# Altium footprint library Water Tank Telemeter.PcbLib: 47 footprints (part 1 of 3)
Each footprint in its own frame and in the unit in brackets; x right, y up, seen from the top. Pads: shape width x height; smd on the part's side, far side on the other; paste and mask are expansions set on the pad; w line width, h text height; cw(c..) or ccw(c..) is an arc to the next point about the centre after c.
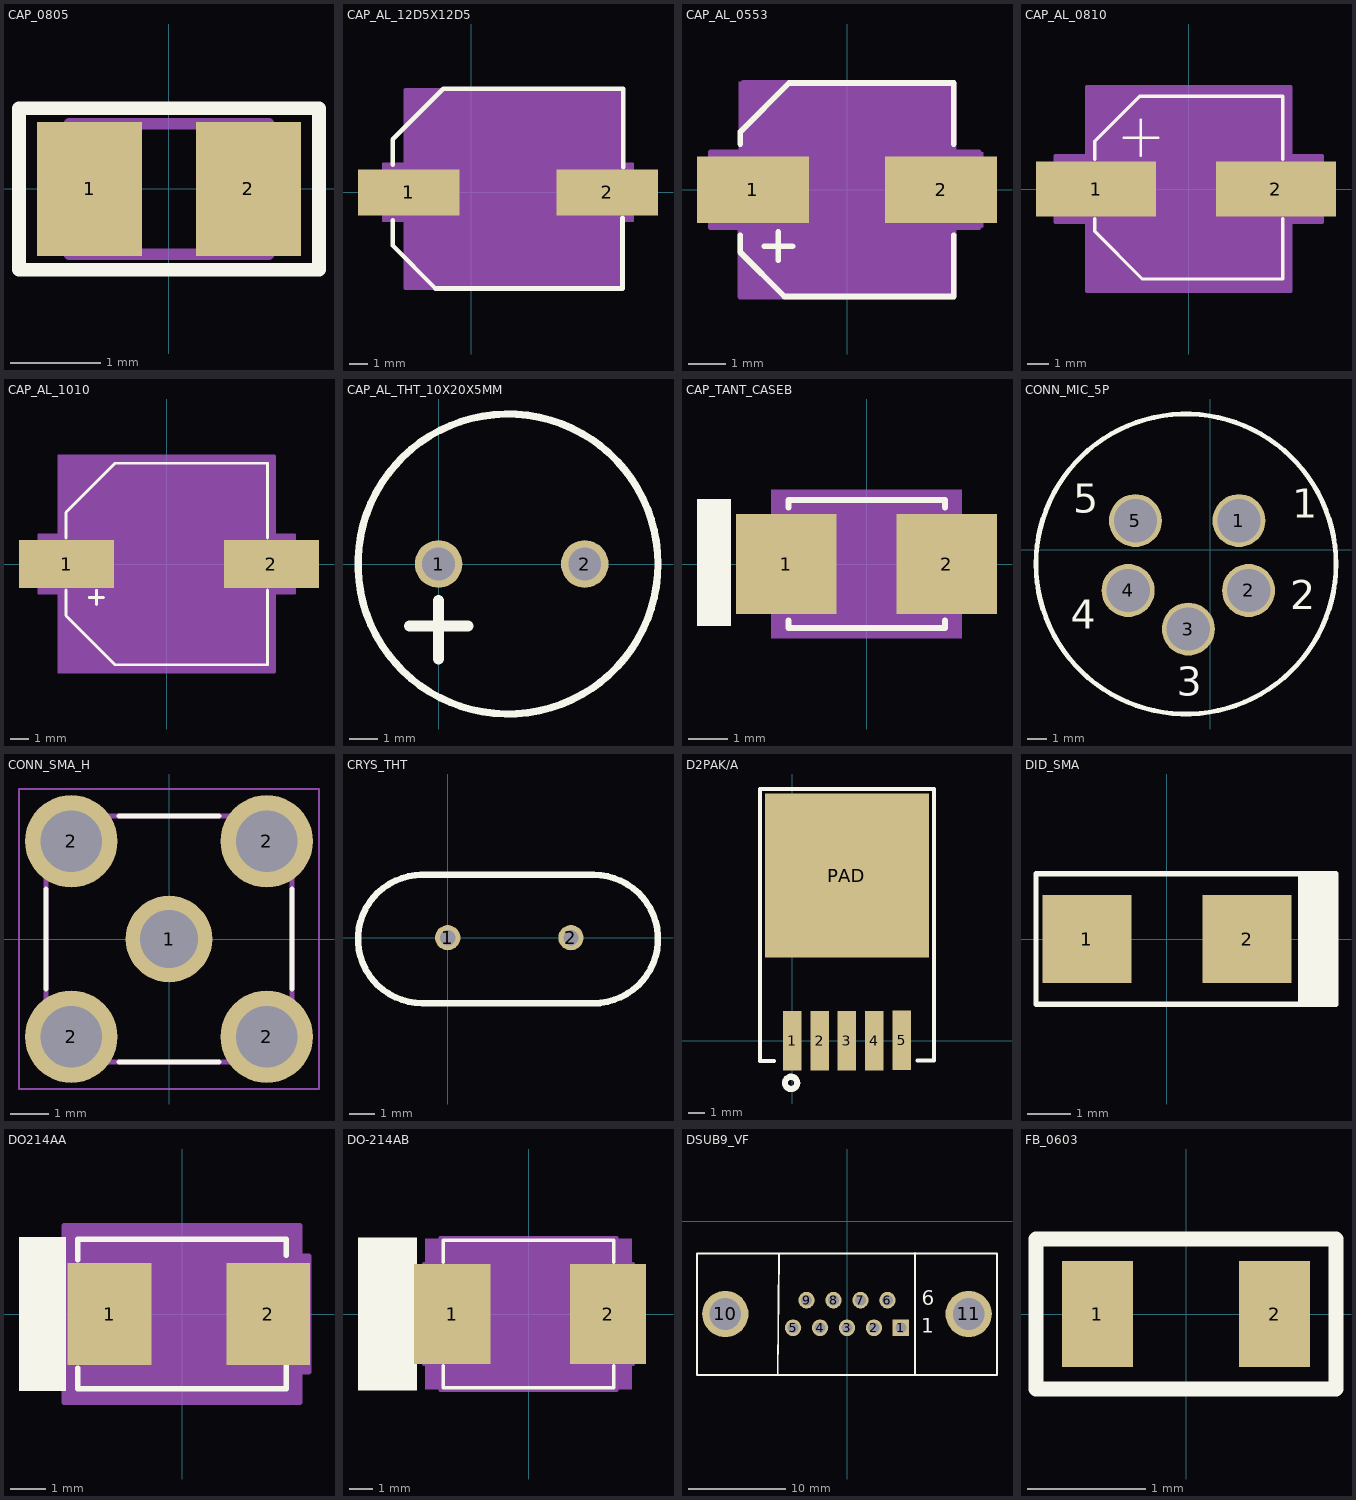
[diagram p0: the footprints below, top view; thin cyan lines are the x and y axes]

## CAP_0805 [mm]
pads (2):
  rect 1.16x1.47 smd: 1(-0.875,0) 2(0.875,0)
Top Overlay:
  lines w0.152: -1.651,-0.889 -1.651,0.889 1.651,0.889 1.651,-0.889 -1.651,-0.889
Mechanical 13:
  lines w0.127: -1.1,-0.72 -1.1,0.72 ; -1.1,-0.72 1.1,-0.72 ; -1.1,-0.72 -1.1,0.72 ; -1.1,-0.72 1.1,-0.72 ; -1.1,0.72 1.1,0.72 ; -1.1,0.72 1.1,0.72 ; 1.1,-0.72 1.1,0.72 ; 1.1,-0.72 1.1,0.72
3D body "User Library-0805 SMD Capacitor-1.STEP": height 0.78, standoff 0, extent -1.3,-0.625 1.3,0.625

## CAP_AL_12D5X12D5 [mil]
pads (2):
  rect 220x100 smd paste+0 mask+0: 1(-135,0) 2(295,0)
Top Overlay:
  lines w10: -170,-60 -170,-115 -77,-208 328,-208 328,-54.6 ; -170,60 -170,115 -60,225 -15,225 330,225 330,54.6
Mechanical 13:
  circle w0: c-103,0 r3
  lines w1: -123,-101.5 -21.5,-203 ; -123,101.5 -21.5,203 ; -123,-203 -123,203 283,203 283,-203 -123,-203
Mechanical 15:
  region: -143,-61.5 -190.5,-61.5 -190.5,61.5 -143,61.5 -143,223 330,223 330,61.5 350.5,61.5 350.5,-61.5 330,-61.5 330,-210 -143,-210
  lines w6: -190.5,-61.5 -143,-61.5 -143,-208 303,-208 303,-61.5 350.5,-61.5 350.5,61.5 303,61.5 303,223 -143,223 -143,61.5 -190.5,61.5 -190.5,-61.5
3D body: height 10, standoff 0, extent 80,0 90,10
3D body "User Library-CAP SMD SVP 10_0x12_6.STEP": height 496.06, standoff 0, extent -138.07,-200.51 295,205

## CAP_AL_0553 [mil]
pads (2):
  rect 119x71 smd paste+0 mask+0: 1(-100,0) 2(100,0)
Top Overlay:
  lines w6: -113.5,-48.6 -113.5,-66.5 -66.5,-113.5 113.5,-113.5 113.5,-48.6 ; -113.5,48.6 -113.5,61.5 -61.5,113.5 113.5,113.5 113.5,48.6 ; -88,-60 -58,-60 ; -73,-75 -73,-45
Mechanical 13:
  lines w1: -88,-60 -58,-60 ; -73,-75 -73,-45
Mechanical 15:
  region: -115,-40 -145,-40 -145,40 -115,40 -115,115 113.5,115 113.5,40 145,40 145,-40 113.5,-40 113.5,-113.5 -115,-113.5
  lines w6: -145,-40 -145,40 -110,40 -110,113.5 113.5,113.5 113.5,40 140,40 140,-40 113.5,-40 113.5,-113.5 -113.5,-113.5 -113.5,-40 -145,-40
3D body: height 10, standoff 0, extent 0,0 10,10
3D body "User Library-UWT1C100MCL1GB.STEP": height 213.46, standoff -0.14, extent -86.11,-85 95,84.29

## CAP_AL_0810 [mil]
pads (2):
  rect 220x100 smd paste+0 mask+0: 1(-170,0) 2(160,0)
Top Overlay:
  lines w5: -119,94 -56,94 ; -88,61 -88,127
  lines w6: -172.5,-54.6 -172.5,-77.5 -85,-165 172.5,-165 172.5,-54.6 ; -172.5,54.6 -172.5,87.5 -90,170 172.5,170 172.5,54.6
Mechanical 13:
  circle w0: c-147.5,0 r3
  lines w1: -167.5,-83.75 -83.75,-167.5 ; -167.5,83.75 -83.75,167.5 ; -167.5,-167.5 -167.5,167.5 167.5,167.5 167.5,-167.5 -167.5,-167.5
Mechanical 15:
  region: -187.5,-61.5 -245,-61.5 -245,61.5 -187.5,61.5 -187.5,187.5 187.5,187.5 187.5,61.5 245,61.5 245,-61.5 187.5,-61.5 187.5,-187.5 -187.5,-187.5
  lines w6: -245,-61.5 -187.5,-61.5 -187.5,-187.5 187.5,-187.5 187.5,-61.5 245,-61.5 245,61.5 187.5,61.5 187.5,187.5 -187.5,187.5 -187.5,61.5 -245,61.5 -245,-61.5
3D body: height 10, standoff 0, extent 0,0 10,10
3D body "User Library-SMD 8x10.STEP": height 334.65, standoff 0, extent -190.95,-158.38 190.94,168.39

## CAP_AL_1010 [mil]
pads (2):
  rect 200x100 smd paste+0 mask+0: 1(-210,0) 2(220,0)
Top Overlay:
  lines w6: -211.5,-54.6 -211.5,-108.5 -108.5,-211.5 211.5,-211.5 211.5,-54.6 ; -211.5,54.6 -211.5,108.5 -108.5,211.5 211.5,211.5 211.5,54.6 ; -162.5,-70 -132.5,-70 ; -147.5,-85 -147.5,-55
Mechanical 13:
  lines w1: -206.5,-103.25 -103.25,-206.5 ; -206.5,103.25 -103.25,206.5 ; -162.5,-70 -132.5,-70 ; -147.5,-85 -147.5,-55 ; -206.5,-206.5 -206.5,206.5 206.5,206.5 206.5,-206.5 -206.5,-206.5
Mechanical 15:
  region: -226.5,-61.5 -268.5,-61.5 -268.5,61.5 -226.5,61.5 -226.5,226.5 226.5,226.5 226.5,61.5 268.5,61.5 268.5,-61.5 226.5,-61.5 226.5,-226.5 -226.5,-226.5
  lines w6: -268.5,-61.5 -226.5,-61.5 -226.5,-226.5 226.5,-226.5 226.5,-61.5 268.5,-61.5 268.5,61.5 226.5,61.5 226.5,226.5 -226.5,226.5 -226.5,61.5 -268.5,61.5 -268.5,-61.5
3D body: height 10, standoff 0, extent 0,0 10,10
3D body "User Library-CC1010.STEP": height 409.84, standoff 0, extent -213.54,-203.73 219.53,205.72

## CAP_AL_THT_10X20X5MM [mil]
pads (2):
  round 65 hole 45: 1(0,0) 2(200,0)
Top Overlay:
  circle w10: c95,0 r205.24
  lines w15: -40,-85 40,-85 ; 0,-130 0,-50
3D body "User Library-Capacitor Radial Aluminum 10x12x5mm.STEP": height 492.17, standoff -157.48, extent -104.99,-199.99 295.01,200.01

## CAP_TANT_CASEB [mil]
pads (2):
  rect 100x100 smd paste+0 mask+0: 1(-80,0) 2(80,0)
Top Overlay:
  rectangle: -169,-62 -135,65
  lines w6: -78,-56.45 -78,-64 78,-64 78,-56.45 ; -78,56.45 -78,64 78,64 78,56.45
Mechanical 5:
  region: 95,-74 -95,-74 -95,74 95,74
Mechanical 13:
  circle w0: c-63,0 r3
  lines w1: -73,-59 73,-59 73,59 -73,59 -73,-59
Mechanical 15:
  region: -77,-47.5 -80,-47.5 -80,47.5 -77,47.5 -77,63 77,63 77,47.5 80,47.5 80,-47.5 77,-47.5 77,-63 -77,-63
  lines w6: -80,-47.5 -80,47.5 -77,47.5 -77,63 77,63 77,47.5 80,47.5 80,-47.5 77,-47.5 77,-63 -77,-63 -77,-47.5 -80,-47.5
3D body: height 10, standoff 0, extent 0,0 10,10
3D body "User Library-CaseB_3528-21.STEP": height 74.8, standoff 0, extent -68.89,-55.11 68.9,55.12

## CONN_MIC_5P [mil]
pads (5):
  round 110 hole 90: 1(60,60) 2(80,-85) 3(-45,-165) 4(-170,-85) 5(-155,60)
Top Overlay:
  circle w10: c-50,-30 r311.45
  text "5" at -284,76 h60
  text "4" at -289,-164 h60
  text "3" at -69,-304 h60
  text "2" at 166,-124 h60
  text "1" at 171,66 h60
3D body "Conector Mic 5 Pines.STEP": height 600, standoff -167.72, extent -469.28,-411.74 379.28,330

## CONN_SMA_H [mm]
pads (5):
  round 2.25 hole 1.5: 1(0,0)
  round 2.4 hole 1.6: 2(-2.54,-2.54) 2(-2.54,2.54) 2(2.54,-2.54) 2(2.54,2.54)
Top Overlay:
  lines w0.127: -3.2,-1.3 -3.2,1.3 ; -1.3,-3.2 1.3,-3.2 ; -1.3,3.2 1.3,3.2 ; 3.2,-1.3 3.2,1.3
Mechanical 13:
  lines w0.127: -3.2,-3.2 3.2,-3.2 ; -3.2,-3.2 -3.2,3.2 ; -3.2,-3.2 3.2,-3.2 ; -3.2,-3.2 -3.2,3.2 ; -3.2,3.2 3.2,3.2 ; -3.2,3.2 3.2,3.2 ; 3.2,-3.2 3.2,3.2 ; 3.2,-3.2 3.2,3.2
Mechanical 15:
  lines w0.05: -3.9,-3.9 3.9,-3.9 3.9,3.9 -3.9,3.9 -3.9,-3.9
3D body "User Library-901-143-6RFX.STEP": height 9.86, standoff -3.94, extent -3.518,-3.449 11.582,3.551

## CRYS_THT [mm]
pads (2):
  round 1 hole 0.6: 1(0,0) 2(4.88,0)
Top Overlay:
  lines w0.254: -1.067,2.489 5.791,2.489 cw(c5.791,-0.051) 5.791,-2.591 ; -1.016,-2.591 cw(c-1.016,-0.051) -1.016,2.489 ; -0.965,-2.591 6.02,-2.591

## D2PAK/A [mm]
pads (6):
  rect 1.15x3.7 smd: 1(0,0) 2(1.7,0) 3(3.4,0) 4(5.1,0) 5(6.8,0.025)
  rect 10.2x10.2 smd: PAD(3.4,10.287)
Top Overlay:
  circle w0.381: c-0.076,-2.616 r0.381
  lines w0.254: -2.007,-1.219 -2.007,15.672 5.08,15.672 ; -2.007,0.628 -2.007,-1.245 -1.15,-1.245 ; 4.978,15.672 8.814,15.672 8.814,-1.168 ; 7.798,-1.219 8.814,-1.219 8.814,0.628
3D body "User Library-P2PAK_A.STEP": height 4.51, standoff -0.04, extent -1.696,-0.93 8.504,14.495

## DID_SMA [mm]
pads (2):
  rect 2.07x2.06 smd: 1(-1.865,0) 2(1.865,0)
Top Overlay:
  rectangle: 3.048,-1.524 3.937,1.524
  lines w0.127: -3.048,-1.524 3.937,-1.524 3.937,1.524 -3.048,1.524 -3.048,-0.127 -3.048,-1.524
3D body "User Library-DO-214AC(SMA).STEP": height 2.29, standoff 0, extent -2.616,-1.397 2.87,1.397

## DO214AA [mm]
pads (2):
  rect 2.35x2.85 smd paste+0 mask+0: 1(-2.032,0) 2(2.413,0)
Top Overlay:
  rectangle: -4.572,-2.159 -3.251,2.159
  lines w0.152: -2.922,-1.524 -2.922,-2.097 2.922,-2.097 2.922,-1.438 ; -2.922,1.525 -2.922,2.097 2.921,2.097 ; 2.921,1.651 2.921,2.032
Mechanical 13:
  lines w0.025: -2.795,-1.97 -2.795,1.97 2.795,1.97 2.795,-1.97 -2.795,-1.97
Mechanical 15:
  region: -3.303,-1.613 -3.557,-1.613 -3.557,1.613 -3.303,1.613 -3.303,2.478 3.303,2.478 3.303,1.613 3.557,1.613 3.557,-1.613 3.303,-1.613 3.303,-2.478 -3.303,-2.478
  lines w0.152: -3.557,-1.613 -3.303,-1.613 -3.303,-2.478 3.303,-2.478 3.303,-1.613 3.557,-1.613 3.557,1.613 3.303,1.613 3.303,2.478 -3.303,2.478 -3.303,1.613 -3.557,1.613 -3.557,-1.613
3D body "User Library-DO-214AA(SMB).STEP": height 2.64, standoff 0, extent -2.54,-1.848 3.048,2.102
3D body: height 0.25, standoff 0, extent 0,0 0.254,0.254

## DO-214AB [mil]
pads (2):
  rect 130x170 smd paste+0 mask+0: 1(-130,0) 2(135,0)
Top Overlay:
  rectangle: -290,-130 -190,130
  lines w6: -145,-88.1 -145,-125 145,-125 145,-88.1 ; -145,88.1 -145,125 145,125 145,88.1
Mechanical 5:
  region: 175.5,-127.5 -175.5,-127.5 -175.5,127.5 175.5,127.5
Mechanical 13:
  lines w1: -140,-120 140,-120 140,120 -140,120 -140,-120
Mechanical 15:
  region: -150,-85 -178,-85 -178,85 -150,85 -150,130 150,130 150,85 178,85 178,-85 150,-85 150,-130 -150,-130
  lines w6: -178,-85 -178,85 -150,85 -150,130 150,130 150,85 178,85 178,-85 150,-85 150,-130 -150,-130 -150,-85 -178,-85
3D body "User Library-DO-214AB-SMC.STEP": height 94.53, standoff -1.97, extent -153.54,-116.14 153.54,116.14
3D body: height 10, standoff 0, extent 0,0 10,10

## DSUB9_VF [mm]
pads (11):
  rect 1.69x1.69 hole 1.09: 1(5.54,-10.92)
  round 1.69 hole 1.09: 2(2.77,-10.92) 3(0,-10.92) 4(-2.77,-10.92) 5(-5.54,-10.92) 6(4.155,-8.08) 7(1.385,-8.08) 8(-1.385,-8.08) 9(-4.155,-8.08)
  round 4.76 hole 3.26: 10(-12.495,-9.5) 11(12.495,-9.5)
Top Overlay:
  lines w0.2: -7.112,-15.748 -7,-3.381 ; 7,-15.621 7,-3.254 ; -15.4,-15.748 15.4,-15.748 15.4,-3.302 -15.4,-3.302 -15.4,-15.748
  text "1" at 7.62,-11.43 h1.5
  text "6" at 7.651,-8.59 h1.5
3D body "User Library-D-SUB, 9 pin, solder cup, FM.STEP": height 11.63, standoff -2.82, extent -15.494,-15.748 15.494,-3.302

## FB_0603 [mm]
pads (2):
  rect 0.6x0.9 smd: 1(-0.75,0) 2(0.75,0)
Top Overlay:
  lines w0.127: -1.27,-0.635 -1.27,0.289 -1.27,0.635 1.27,0.635 1.27,-0.635 -1.27,-0.635
3D body "User Library-FB_1608-1.STEP": height 0.8, standoff 0, extent -0.8,-0.4 0.8,0.4